# Altium schematic symbol library STDC14.SchLib: 1 symbol
Pins are listed as number, name and electrical type; pins without a type are passive.

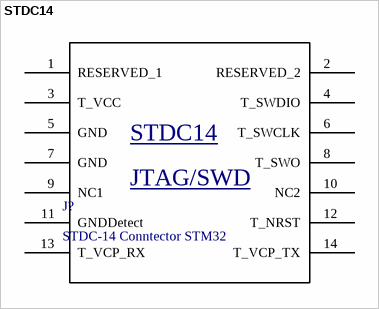
[diagram p0: symbol STDC14]

## STDC14
designator J?, comment STDC-14 Conntector STM32
footprint DIP14
pins: 1 RESERVED_1, 2 RESERVED_2, 3 T_VCC, 4 T_SWDIO, 5 GND, 6 T_SWCLK, 7 GND, 8 T_SWO, 9 NC1, 10 NC2, 11 GNDDetect, 12 T_NRST, 13 T_VCP_RX, 14 T_VCP_TX
text: JTAG/SWD